# Altium schematic symbol library CRCW040210K0FKED.SchLib: 1 symbol
Pins are listed as number, name and electrical type; pins without a type are passive.

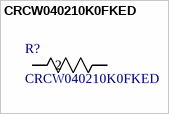
[diagram p0: symbol CRCW040210K0FKED]

## CRCW040210K0FKED
designator R?
D10/CRCW0402 100 10K 1% ET7 e3; Manufacturer_Name: Vishay; Copyright: Copyright (C) 2025 Ultra Librarian. All rights reserved.; Manufacturer_Part_Number: CRCW040210K0FKED
footprint RES_CRCW_0402
pins: 1, 2